# Altium schematic symbol library 2019-09-10_16-15-11.SchLib: 2 symbols
Pins are listed as number, name and electrical type; pins without a type are passive.

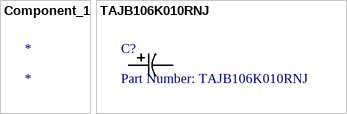
[diagram p0: symbols Component_1 to TAJB106K010RNJ]

## Component_1
designator *

## TAJB106K010RNJ
designator C?, comment Part Number: TAJB106K010RNJ
No Description Available; Vendor: AVX Corporation; Built_By: EMA_UL_Team; Type: DEV; Manufacturer_Part_Number: TAJB106K010RNJ; Copyright: Copyright (C) 2018 Accelerated Designs. All rights reserved; RefDes: RefDes; Value: Value
footprint TAJB
pins: 1, 2